# Altium footprint library Connector Header 254.PcbLib: 156 footprints (part 5 of 11)
Each footprint in its own frame and in the unit in brackets; x right, y up, seen from the top. Pads: shape width x height; smd on the part's side, far side on the other; paste and mask are expansions set on the pad; w line width, h text height; cw(c..) or ccw(c..) is an arc to the next point about the centre after c.
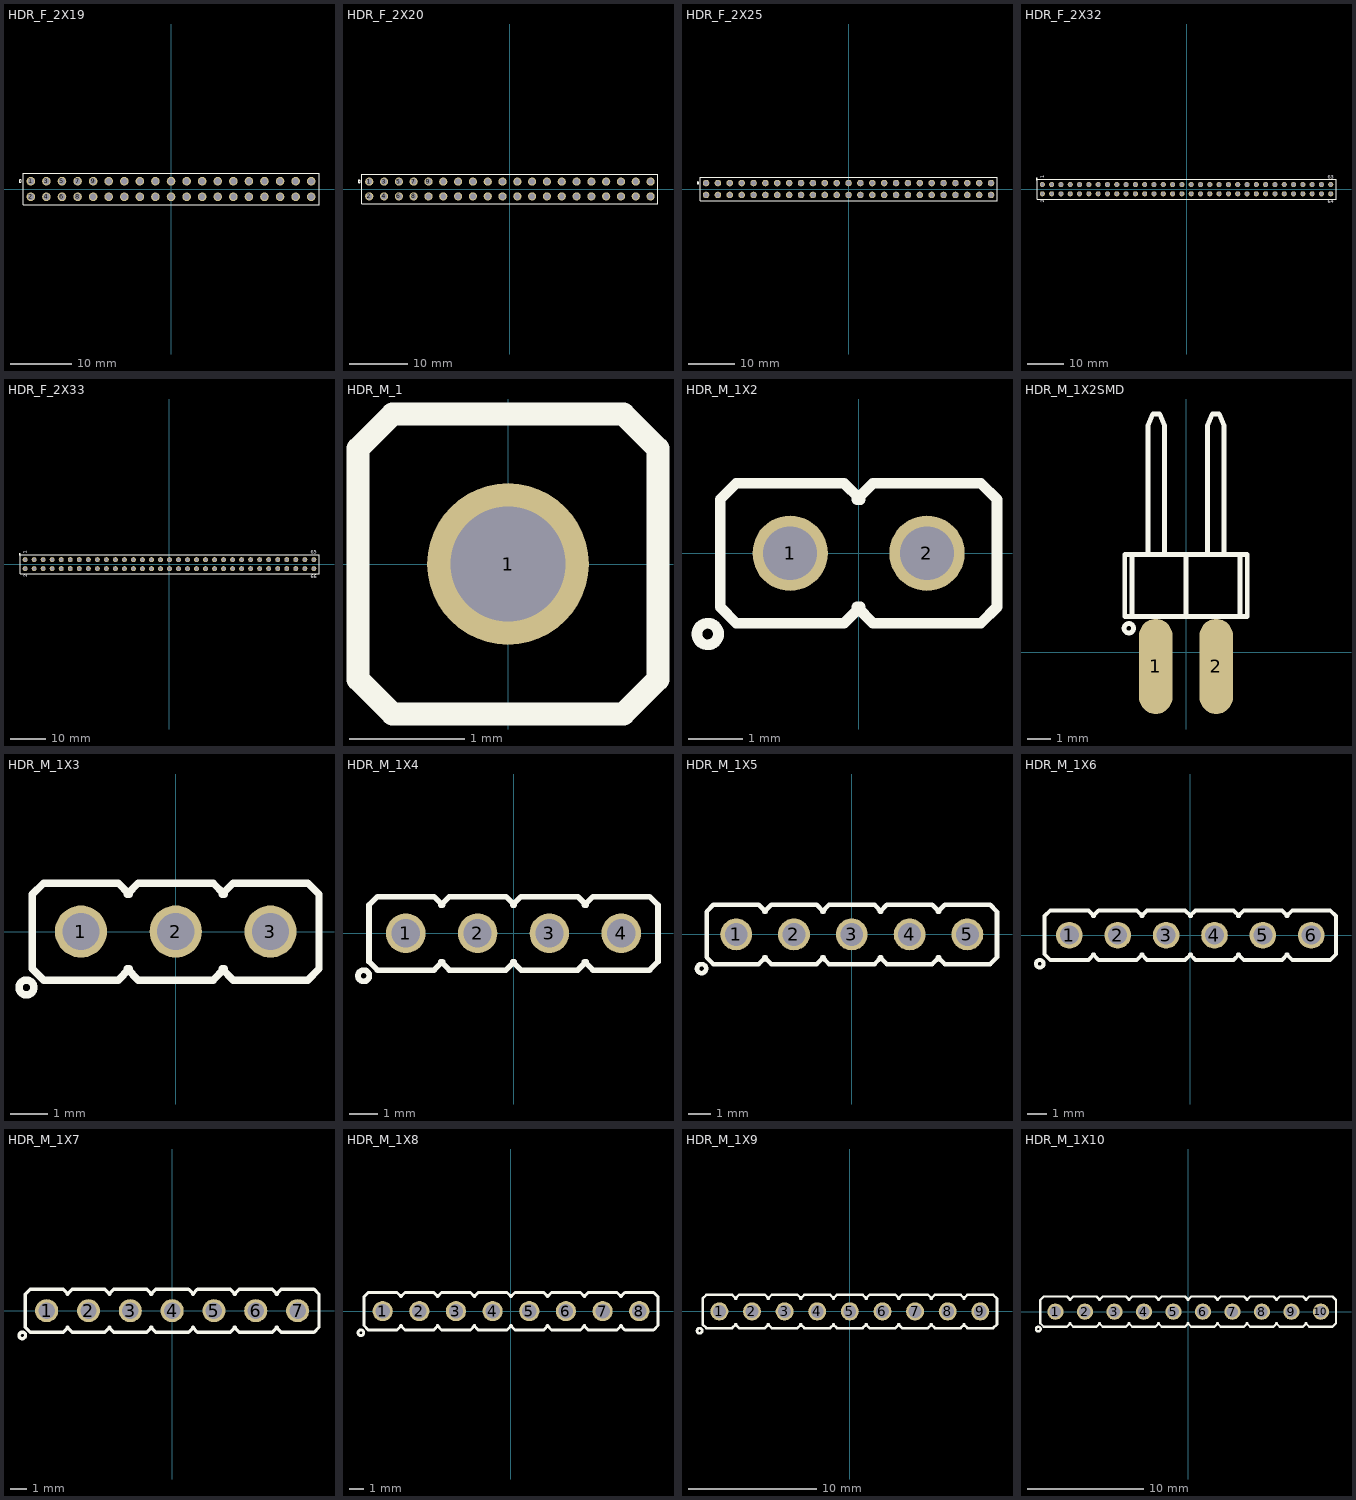
[diagram p4: the footprints below, top view; thin cyan lines are the x and y axes]

## HDR_F_2X19 [mm] "Connector; Header; 19x2 Position"
height 8
pads (38):
  round 1.4 / inner round 1.4 / far side oval 1.4x2.2 hole 1: 1(-22.86,1.27) 2(-22.86,-1.27) 3(-20.32,1.27) 4(-20.32,-1.27) 5(-17.78,1.27) 6(-17.78,-1.27) 7(-15.24,1.27) 8(-15.24,-1.27) 9(-12.7,1.27) 10(-12.7,-1.27) 11(-10.16,1.27) 12(-10.16,-1.27) 13(-7.62,1.27) 14(-7.62,-1.27) 15(-5.08,1.27) 16(-5.08,-1.27) 17(-2.54,1.27) 18(-2.54,-1.27) 19(0,1.27) 20(0,-1.27) 21(2.54,1.27) 22(2.54,-1.27) 23(5.08,1.27) 24(5.08,-1.27) 25(7.62,1.27) 26(7.62,-1.27) 27(10.16,1.27) 28(10.16,-1.27) 29(12.7,1.27) 30(12.7,-1.27) 31(15.24,1.27) 32(15.24,-1.27) 33(17.78,1.27) 34(17.78,-1.27) 35(20.32,1.27) 36(20.32,-1.27) 37(22.86,1.27) 38(22.86,-1.27)
TopOverlay:
  circle w0.2: c-24.59,1.3 r0.2
  lines w0.2: -24.13,-2.54 24.13,-2.54 24.13,2.54 -24.13,2.54 -24.13,-2.54
3D body "PBD-2.stp": height 8.5, standoff -3.15, extent 16.51,-2.54 19.05,2.54
3D body "PBD-2.stp": height 8.5, standoff -3.15, extent 13.97,-2.54 16.51,2.54
3D body "PBD-2.stp": height 8.5, standoff -3.15, extent 19.05,-2.54 21.59,2.54
3D body "PBD-2.stp": height 8.5, standoff -3.15, extent 8.89,-2.54 11.43,2.54
3D body "PBD-2.stp": height 8.5, standoff -3.15, extent 6.35,-2.54 8.89,2.54
3D body "PBD-2.stp": height 8.5, standoff -3.15, extent 11.43,-2.54 13.97,2.54
3D body "PBD-2.stp": height 8.5, standoff -3.15, extent 1.27,-2.54 3.81,2.54
3D body "PBD-2.stp": height 8.5, standoff -3.15, extent -1.27,-2.54 1.27,2.54
3D body "PBD-2.stp": height 8.5, standoff -3.15, extent 3.81,-2.54 6.35,2.54
3D body "PBD-2.stp": height 8.5, standoff -3.15, extent -6.35,-2.54 -3.81,2.54
3D body "PBD-2.stp": height 8.5, standoff -3.15, extent -8.89,-2.54 -6.35,2.54
3D body "PBD-2.stp": height 8.5, standoff -3.15, extent -3.81,-2.54 -1.27,2.54
3D body "PBD-2.stp": height 8.5, standoff -3.15, extent -13.97,-2.54 -11.43,2.54
3D body "PBD-2.stp": height 8.5, standoff -3.15, extent -16.51,-2.54 -13.97,2.54
3D body "PBD-2.stp": height 8.5, standoff -3.15, extent -11.43,-2.54 -8.89,2.54
3D body "PBD-2.stp": height 8.5, standoff -3.15, extent -21.59,-2.54 -19.05,2.54
3D body "PBD-2.stp": height 8.5, standoff -3.15, extent -24.13,-2.54 -21.59,2.54
3D body "PBD-2.stp": height 8.5, standoff -3.15, extent -19.05,-2.54 -16.51,2.54
3D body "PBD-2.stp": height 8.5, standoff -3.15, extent 21.59,-2.54 24.13,2.54

## HDR_F_2X20 [mm] "Connector; Header; 20x2 Position"
height 8
pads (40):
  round 1.4 / inner round 1.4 / far side oval 1.4x2.2 hole 1: 1(-24.13,1.27) 2(-24.13,-1.27) 3(-21.59,1.27) 4(-21.59,-1.27) 5(-19.05,1.27) 6(-19.05,-1.27) 7(-16.51,1.27) 8(-16.51,-1.27) 9(-13.97,1.27) 10(-13.97,-1.27) 11(-11.43,1.27) 12(-11.43,-1.27) 13(-8.89,1.27) 14(-8.89,-1.27) 15(-6.35,1.27) 16(-6.35,-1.27) 17(-3.81,1.27) 18(-3.81,-1.27) 19(-1.27,1.27) 20(-1.27,-1.27) 21(1.27,1.27) 22(1.27,-1.27) 23(3.81,1.27) 24(3.81,-1.27) 25(6.35,1.27) 26(6.35,-1.27) 27(8.89,1.27) 28(8.89,-1.27) 29(11.43,1.27) 30(11.43,-1.27) 31(13.97,1.27) 32(13.97,-1.27) 33(16.51,1.27) 34(16.51,-1.27) 35(19.05,1.27) 36(19.05,-1.27) 37(21.59,1.27) 38(21.59,-1.27) 39(24.13,1.27) 40(24.13,-1.27)
TopOverlay:
  circle w0.2: c-25.86,1.3 r0.2
  lines w0.2: -25.4,-2.54 25.4,-2.54 25.4,2.54 -25.4,2.54 -25.4,-2.54
3D body "PBD-2.stp": height 8.5, standoff -3.15, extent -20.32,-2.54 -17.78,2.54
3D body "PBD-2.stp": height 8.5, standoff -3.15, extent -25.4,-2.54 -22.86,2.54
3D body "PBD-2.stp": height 8.5, standoff -3.15, extent -22.86,-2.54 -20.32,2.54
3D body "PBD-2.stp": height 8.5, standoff -3.15, extent -12.7,-2.54 -10.16,2.54
3D body "PBD-2.stp": height 8.5, standoff -3.15, extent -17.78,-2.54 -15.24,2.54
3D body "PBD-2.stp": height 8.5, standoff -3.15, extent -15.24,-2.54 -12.7,2.54
3D body "PBD-2.stp": height 8.5, standoff -3.15, extent -5.08,-2.54 -2.54,2.54
3D body "PBD-2.stp": height 8.5, standoff -3.15, extent -10.16,-2.54 -7.62,2.54
3D body "PBD-2.stp": height 8.5, standoff -3.15, extent -7.62,-2.54 -5.08,2.54
3D body "PBD-2.stp": height 8.5, standoff -3.15, extent 2.54,-2.54 5.08,2.54
3D body "PBD-2.stp": height 8.5, standoff -3.15, extent -2.54,-2.54 0,2.54
3D body "PBD-2.stp": height 8.5, standoff -3.15, extent 0,-2.54 2.54,2.54
3D body "PBD-2.stp": height 8.5, standoff -3.15, extent 10.16,-2.54 12.7,2.54
3D body "PBD-2.stp": height 8.5, standoff -3.15, extent 5.08,-2.54 7.62,2.54
3D body "PBD-2.stp": height 8.5, standoff -3.15, extent 7.62,-2.54 10.16,2.54
3D body "PBD-2.stp": height 8.5, standoff -3.15, extent 17.78,-2.54 20.32,2.54
3D body "PBD-2.stp": height 8.5, standoff -3.15, extent 12.7,-2.54 15.24,2.54
3D body "PBD-2.stp": height 8.5, standoff -3.15, extent 15.24,-2.54 17.78,2.54
3D body "PBD-2.stp": height 8.5, standoff -3.15, extent 20.32,-2.54 22.86,2.54
3D body "PBD-2.stp": height 8.5, standoff -3.15, extent 22.86,-2.54 25.4,2.54

## HDR_F_2X25 [mm] "Connector; Header; 20x2 Position"
height 8
pads (50):
  round 1.4 / inner round 1.4 / far side oval 1.4x2.2 hole 1: 1(-30.48,1.27) 2(-30.48,-1.27) 3(-27.94,1.27) 4(-27.94,-1.27) 5(-25.4,1.27) 6(-25.4,-1.27) 7(-22.86,1.27) 8(-22.86,-1.27) 9(-20.32,1.27) 10(-20.32,-1.27) 11(-17.78,1.27) 12(-17.78,-1.27) 13(-15.24,1.27) 14(-15.24,-1.27) 15(-12.7,1.27) 16(-12.7,-1.27) 17(-10.16,1.27) 18(-10.16,-1.27) 19(-7.62,1.27) 20(-7.62,-1.27) 21(-5.08,1.27) 22(-5.08,-1.27) 23(-2.54,1.27) 24(-2.54,-1.27) 25(0,1.27) 26(0,-1.27) 27(2.54,1.27) 28(2.54,-1.27) 29(5.08,1.27) 30(5.08,-1.27) 31(7.62,1.27) 32(7.62,-1.27) 33(10.16,1.27) 34(10.16,-1.27) 35(12.7,1.27) 36(12.7,-1.27) 37(15.24,1.27) 38(15.24,-1.27) 39(17.78,1.27) 40(17.78,-1.27) 41(20.32,1.27) 42(20.32,-1.27) 43(22.86,1.27) 44(22.86,-1.27) 45(25.4,1.27) 46(25.4,-1.27) 47(27.94,1.27) 48(27.94,-1.27) 49(30.48,1.27) 50(30.48,-1.27)
TopOverlay:
  circle w0.2: c-32.21,1.3 r0.2
  lines w0.2: -31.75,-2.54 31.75,-2.54 31.75,2.54 -31.75,2.54 -31.75,-2.54
3D body "PBD-2.stp": height 8.5, standoff -3.15, extent -26.67,-2.54 -24.13,2.54
3D body "PBD-2.stp": height 8.5, standoff -3.15, extent -31.75,-2.54 -29.21,2.54
3D body "PBD-2.stp": height 8.5, standoff -3.15, extent -29.21,-2.54 -26.67,2.54
3D body "PBD-2.stp": height 8.5, standoff -3.15, extent -19.05,-2.54 -16.51,2.54
3D body "PBD-2.stp": height 8.5, standoff -3.15, extent -24.13,-2.54 -21.59,2.54
3D body "PBD-2.stp": height 8.5, standoff -3.15, extent -21.59,-2.54 -19.05,2.54
3D body "PBD-2.stp": height 8.5, standoff -3.15, extent -11.43,-2.54 -8.89,2.54
3D body "PBD-2.stp": height 8.5, standoff -3.15, extent -16.51,-2.54 -13.97,2.54
3D body "PBD-2.stp": height 8.5, standoff -3.15, extent -13.97,-2.54 -11.43,2.54
3D body "PBD-2.stp": height 8.5, standoff -3.15, extent -3.81,-2.54 -1.27,2.54
3D body "PBD-2.stp": height 8.5, standoff -3.15, extent -8.89,-2.54 -6.35,2.54
3D body "PBD-2.stp": height 8.5, standoff -3.15, extent -6.35,-2.54 -3.81,2.54
3D body "PBD-2.stp": height 8.5, standoff -3.15, extent 3.81,-2.54 6.35,2.54
3D body "PBD-2.stp": height 8.5, standoff -3.15, extent -1.27,-2.54 1.27,2.54
3D body "PBD-2.stp": height 8.5, standoff -3.15, extent 1.27,-2.54 3.81,2.54
3D body "PBD-2.stp": height 8.5, standoff -3.15, extent 11.43,-2.54 13.97,2.54
3D body "PBD-2.stp": height 8.5, standoff -3.15, extent 6.35,-2.54 8.89,2.54
3D body "PBD-2.stp": height 8.5, standoff -3.15, extent 8.89,-2.54 11.43,2.54
3D body "PBD-2.stp": height 8.5, standoff -3.15, extent 13.97,-2.54 16.51,2.54
3D body "PBD-2.stp": height 8.5, standoff -3.15, extent 16.51,-2.54 19.05,2.54
3D body "PBD-2.stp": height 8.5, standoff -3.15, extent 19.05,-2.54 21.59,2.54
3D body "PBD-2.stp": height 8.5, standoff -3.15, extent 21.59,-2.54 24.13,2.54
3D body "PBD-2.stp": height 8.5, standoff -3.15, extent 24.13,-2.54 26.67,2.54
3D body "PBD-2.stp": height 8.5, standoff -3.15, extent 26.67,-2.54 29.21,2.54
3D body "PBD-2.stp": height 8.5, standoff -3.15, extent 29.21,-2.54 31.75,2.54

## HDR_F_2X32 [mm] "Male Header 2X32 with 2.54 mm Pitch"
pads (64):
  round 1.4 / inner round 1.4 / far side oval 1.4x2.2 hole 1: 1(-39.37,1.27) 2(-39.37,-1.27) 3(-36.83,1.27) 4(-36.83,-1.27) 5(-34.29,1.27) 6(-34.29,-1.27) 7(-31.75,1.27) 8(-31.75,-1.27) 9(-29.21,1.27) 10(-29.21,-1.27) 11(-26.67,1.27) 12(-26.67,-1.27) 13(-24.13,1.27) 14(-24.13,-1.27) 15(-21.59,1.27) 16(-21.59,-1.27) 17(-19.05,1.27) 18(-19.05,-1.27) 19(-16.51,1.27) 20(-16.51,-1.27) 21(-13.97,1.27) 22(-13.97,-1.27) 23(-11.43,1.27) 24(-11.43,-1.27) 25(-8.89,1.27) 26(-8.89,-1.27) 27(-6.35,1.27) 28(-6.35,-1.27) 29(-3.81,1.27) 30(-3.81,-1.27) 31(-1.27,1.27) 32(-1.27,-1.27) 33(1.27,1.27) 34(1.27,-1.27) 35(3.81,1.27) 36(3.81,-1.27) 37(6.35,1.27) 38(6.35,-1.27) 39(8.89,1.27) 40(8.89,-1.27) 41(11.43,1.27) 42(11.43,-1.27) 43(13.97,1.27) 44(13.97,-1.27) 45(16.51,1.27) 46(16.51,-1.27) 47(19.05,1.27) 48(19.05,-1.27) 49(21.59,1.27) 50(21.59,-1.27) 51(24.13,1.27) 52(24.13,-1.27) 53(26.67,1.27) 54(26.67,-1.27) 55(29.21,1.27) 56(29.21,-1.27) 57(31.75,1.27) 58(31.75,-1.27) 59(34.29,1.27) 60(34.29,-1.27) 61(36.83,1.27) 62(36.83,-1.27) 63(39.37,1.27) 64(39.37,-1.27)
TopOverlay:
  circle w0.2: c-40.9,2.8 r0.2
  lines w0.2: -40.8,-2.7 -40.8,2.7 40.8,2.7 40.8,-2.7 -40.8,-2.7
  text "63" at 38.6,2.9 h1
  text "64" at 38.6,-3.9 h1
  text "1" at -38.9,3 h1
  text "2" at -38.8,-3.7 h1
3D body "PBD-2.stp": height 8.5, standoff -3.15, extent -35.56,-2.54 -33.02,2.54
3D body "PBD-2.stp": height 8.5, standoff -3.15, extent -40.64,-2.54 -38.1,2.54
3D body "PBD-2.stp": height 8.5, standoff -3.15, extent -38.1,-2.54 -35.56,2.54
3D body "PBD-2.stp": height 8.5, standoff -3.15, extent -27.94,-2.54 -25.4,2.54
3D body "PBD-2.stp": height 8.5, standoff -3.15, extent -33.02,-2.54 -30.48,2.54
3D body "PBD-2.stp": height 8.5, standoff -3.15, extent -30.48,-2.54 -27.94,2.54
3D body "PBD-2.stp": height 8.5, standoff -3.15, extent -20.32,-2.54 -17.78,2.54
3D body "PBD-2.stp": height 8.5, standoff -3.15, extent -25.4,-2.54 -22.86,2.54
3D body "PBD-2.stp": height 8.5, standoff -3.15, extent -22.86,-2.54 -20.32,2.54
3D body "PBD-2.stp": height 8.5, standoff -3.15, extent -12.7,-2.54 -10.16,2.54
3D body "PBD-2.stp": height 8.5, standoff -3.15, extent -17.78,-2.54 -15.24,2.54
3D body "PBD-2.stp": height 8.5, standoff -3.15, extent -15.24,-2.54 -12.7,2.54
3D body "PBD-2.stp": height 8.5, standoff -3.15, extent -5.08,-2.54 -2.54,2.54
3D body "PBD-2.stp": height 8.5, standoff -3.15, extent -10.16,-2.54 -7.62,2.54
3D body "PBD-2.stp": height 8.5, standoff -3.15, extent -7.62,-2.54 -5.08,2.54
3D body "PBD-2.stp": height 8.5, standoff -3.15, extent 2.54,-2.54 5.08,2.54
3D body "PBD-2.stp": height 8.5, standoff -3.15, extent -2.54,-2.54 0,2.54
3D body "PBD-2.stp": height 8.5, standoff -3.15, extent 0,-2.54 2.54,2.54
3D body "PBD-2.stp": height 8.5, standoff -3.15, extent 5.08,-2.54 7.62,2.54
3D body "PBD-2.stp": height 8.5, standoff -3.15, extent 7.62,-2.54 10.16,2.54
3D body "PBD-2.stp": height 8.5, standoff -3.15, extent 10.16,-2.54 12.7,2.54
3D body "PBD-2.stp": height 8.5, standoff -3.15, extent 12.7,-2.54 15.24,2.54
3D body "PBD-2.stp": height 8.5, standoff -3.15, extent 15.24,-2.54 17.78,2.54
3D body "PBD-2.stp": height 8.5, standoff -3.15, extent 17.78,-2.54 20.32,2.54
3D body "PBD-2.stp": height 8.5, standoff -3.15, extent 20.32,-2.54 22.86,2.54
3D body "PBD-2.stp": height 8.5, standoff -3.15, extent 27.94,-2.54 30.48,2.54
3D body "PBD-2.stp": height 8.5, standoff -3.15, extent 22.86,-2.54 25.4,2.54
3D body "PBD-2.stp": height 8.5, standoff -3.15, extent 25.4,-2.54 27.94,2.54
3D body "PBD-2.stp": height 8.5, standoff -3.15, extent 35.56,-2.54 38.1,2.54
3D body "PBD-2.stp": height 8.5, standoff -3.15, extent 30.48,-2.54 33.02,2.54
3D body "PBD-2.stp": height 8.5, standoff -3.15, extent 33.02,-2.54 35.56,2.54
3D body "PBD-2.stp": height 8.5, standoff -3.15, extent 38.1,-2.54 40.64,2.54

## HDR_F_2X33 [mm] "Male Header 2X32 with 2.54 mm Pitch"
pads (66):
  round 1.4 / inner round 1.4 / far side oval 1.4x2.2 hole 1: 1(-40.64,1.27) 2(-40.64,-1.27) 3(-38.1,1.27) 4(-38.1,-1.27) 5(-35.56,1.27) 6(-35.56,-1.27) 7(-33.02,1.27) 8(-33.02,-1.27) 9(-30.48,1.27) 10(-30.48,-1.27) 11(-27.94,1.27) 12(-27.94,-1.27) 13(-25.4,1.27) 14(-25.4,-1.27) 15(-22.86,1.27) 16(-22.86,-1.27) 17(-20.32,1.27) 18(-20.32,-1.27) 19(-17.78,1.27) 20(-17.78,-1.27) 21(-15.24,1.27) 22(-15.24,-1.27) 23(-12.7,1.27) 24(-12.7,-1.27) 25(-10.16,1.27) 26(-10.16,-1.27) 27(-7.62,1.27) 28(-7.62,-1.27) 29(-5.08,1.27) 30(-5.08,-1.27) 31(-2.54,1.27) 32(-2.54,-1.27) 33(0,1.27) 34(0,-1.27) 35(2.54,1.27) 36(2.54,-1.27) 37(5.08,1.27) 38(5.08,-1.27) 39(7.62,1.27) 40(7.62,-1.27) 41(10.16,1.27) 42(10.16,-1.27) 43(12.7,1.27) 44(12.7,-1.27) 45(15.24,1.27) 46(15.24,-1.27) 47(17.78,1.27) 48(17.78,-1.27) 49(20.32,1.27) 50(20.32,-1.27) 51(22.86,1.27) 52(22.86,-1.27) 53(25.4,1.27) 54(25.4,-1.27) 55(27.94,1.27) 56(27.94,-1.27) 57(30.48,1.27) 58(30.48,-1.27) 59(33.02,1.27) 60(33.02,-1.27) 61(35.56,1.27) 62(35.56,-1.27) 63(38.1,1.27) 64(38.1,-1.27) 65(40.64,1.27) 66(40.64,-1.27)
TopOverlay:
  circle w0.2: c-42.17,2.8 r0.2
  lines w0.2: -42.07,-2.7 -42.07,2.7 42.1,2.7 42.1,-2.7 -42.07,-2.7
  text "65" at 39.83,2.9 h1
  text "66" at 39.83,-3.9 h1
  text "1" at -40.17,3 h1
  text "2" at -40.07,-3.7 h1
3D body "PBD-2.stp": height 8.5, standoff -3.15, extent 39.37,-2.54 41.91,2.54
3D body "PBD-2.stp": height 8.5, standoff -3.15, extent -36.83,-2.54 -34.29,2.54
3D body "PBD-2.stp": height 8.5, standoff -3.15, extent -41.91,-2.54 -39.37,2.54
3D body "PBD-2.stp": height 8.5, standoff -3.15, extent -39.37,-2.54 -36.83,2.54
3D body "PBD-2.stp": height 8.5, standoff -3.15, extent -29.21,-2.54 -26.67,2.54
3D body "PBD-2.stp": height 8.5, standoff -3.15, extent -34.29,-2.54 -31.75,2.54
3D body "PBD-2.stp": height 8.5, standoff -3.15, extent -31.75,-2.54 -29.21,2.54
3D body "PBD-2.stp": height 8.5, standoff -3.15, extent -21.59,-2.54 -19.05,2.54
3D body "PBD-2.stp": height 8.5, standoff -3.15, extent -26.67,-2.54 -24.13,2.54
3D body "PBD-2.stp": height 8.5, standoff -3.15, extent -24.13,-2.54 -21.59,2.54
3D body "PBD-2.stp": height 8.5, standoff -3.15, extent -13.97,-2.54 -11.43,2.54
3D body "PBD-2.stp": height 8.5, standoff -3.15, extent -19.05,-2.54 -16.51,2.54
3D body "PBD-2.stp": height 8.5, standoff -3.15, extent -16.51,-2.54 -13.97,2.54
3D body "PBD-2.stp": height 8.5, standoff -3.15, extent -6.35,-2.54 -3.81,2.54
3D body "PBD-2.stp": height 8.5, standoff -3.15, extent -11.43,-2.54 -8.89,2.54
3D body "PBD-2.stp": height 8.5, standoff -3.15, extent -8.89,-2.54 -6.35,2.54
3D body "PBD-2.stp": height 8.5, standoff -3.15, extent 1.27,-2.54 3.81,2.54
3D body "PBD-2.stp": height 8.5, standoff -3.15, extent -3.81,-2.54 -1.27,2.54
3D body "PBD-2.stp": height 8.5, standoff -3.15, extent -1.27,-2.54 1.27,2.54
3D body "PBD-2.stp": height 8.5, standoff -3.15, extent 3.81,-2.54 6.35,2.54
3D body "PBD-2.stp": height 8.5, standoff -3.15, extent 6.35,-2.54 8.89,2.54
3D body "PBD-2.stp": height 8.5, standoff -3.15, extent 8.89,-2.54 11.43,2.54
3D body "PBD-2.stp": height 8.5, standoff -3.15, extent 11.43,-2.54 13.97,2.54
3D body "PBD-2.stp": height 8.5, standoff -3.15, extent 13.97,-2.54 16.51,2.54
3D body "PBD-2.stp": height 8.5, standoff -3.15, extent 16.51,-2.54 19.05,2.54
3D body "PBD-2.stp": height 8.5, standoff -3.15, extent 19.05,-2.54 21.59,2.54
3D body "PBD-2.stp": height 8.5, standoff -3.15, extent 26.67,-2.54 29.21,2.54
3D body "PBD-2.stp": height 8.5, standoff -3.15, extent 21.59,-2.54 24.13,2.54
3D body "PBD-2.stp": height 8.5, standoff -3.15, extent 24.13,-2.54 26.67,2.54
3D body "PBD-2.stp": height 8.5, standoff -3.15, extent 34.29,-2.54 36.83,2.54
3D body "PBD-2.stp": height 8.5, standoff -3.15, extent 29.21,-2.54 31.75,2.54
3D body "PBD-2.stp": height 8.5, standoff -3.15, extent 31.75,-2.54 34.29,2.54
3D body "PBD-2.stp": height 8.5, standoff -3.15, extent 36.83,-2.54 39.37,2.54

## HDR_M_1 [mm] "Connector; Header; 1 Position"
pads (1):
  round 1.4 / inner round 1.4 / far side oval 1.4x2.2 hole 1 mask+0.1: 1(0,0)
TopOverlay:
  lines w0.2: -1.3,-1 -1.3,1 -1,1.3 1,1.3 1.3,1 1.3,-1 1,-1.3 -1,-1.3 -1.3,-1
3D body "PLS-1.step": height 8.54, standoff -2.9, extent -1.27,-1.27 1.27,1.27

## HDR_M_1X2 [mm] "Connector; Header; 2 Position"
pads (2):
  round 1.4 / inner round 1.4 / far side oval 1.4x2.2 hole 1 mask+0.1: 1(-1.27,0) 2(1.27,0)
TopOverlay:
  circle w0.2: c-2.8,-1.5 r0.2
  lines w0.2: -0.03,-1 0.27,-1.3 2.27,-1.3 2.57,-1 2.57,1 2.27,1.3 0.27,1.3 -0.03,1 ; 0.03,-1 -0.27,-1.3 -2.27,-1.3 -2.57,-1 -2.57,1 -2.27,1.3 -0.27,1.3 0.03,1
3D body "pin_header_aw140-eg-g02a.stp": height 8.72, standoff -3.68, extent -2.54,-1.25 2.44,1.25

## HDR_M_1X2SMD [mm] "Connector; Header; 2 Position"
height 1.8
pads (2):
  oval 1.4x4 smd mask+0.1: 1(-1.27,-0.6) 2(1.27,-0.6)
TopOverlay:
  circle w0.2: c-2.4,1 r0.2
  lines w0.2: -2.27,1.5 -2.27,4.1 ; -1.6,4.1 -1.6,9.5 -1.4,10 -1.1,10 -0.9,9.5 ; -0.9,4.1 -0.9,9.5 ; 0,1.5 0,4.1 ; 0.9,4.1 0.9,9.5 ; 1.6,4.1 1.6,9.5 1.4,10 1.1,10 0.9,9.5 ; 2.27,1.5 2.27,4.1 ; -0.9,9.5 -0.9,9.5 ; 0.9,9.5 0.9,9.5 ; -2.57,1.5 2.57,1.5 2.57,4.1 -2.57,4.1 -2.57,1.5
3D body "pin_header_aw140-eg-g02a.stp": height 1.55, standoff -0.95, extent -2.54,-2.38 2.44,10.02

## HDR_M_1X3 [mm] "Connector; Header; 3 Position"
pads (3):
  round 1.4 / inner round 1.4 / far side oval 1.4x2.2 hole 1 mask+0.1: 1(-2.54,0) 2(0,0) 3(2.54,0)
TopOverlay:
  circle w0.2: c-4,-1.5 r0.2
  lines w0.2: -1.3,-1 -1,-1.3 1,-1.3 1.3,-1 ; -1.3,1 -1,1.3 1,1.3 1.3,1 ; -1.24,-1 -1.54,-1.3 -3.54,-1.3 -3.84,-1 -3.84,1 -3.54,1.3 -1.54,1.3 -1.24,1 ; 1.24,-1 1.54,-1.3 3.54,-1.3 3.84,-1 3.84,1 3.54,1.3 1.54,1.3 1.24,1
3D body "PLS-1.step": height 8.54, standoff -2.9, extent 1.295,-1.27 3.835,1.27
3D body "PLS-1.step": height 8.54, standoff -2.9, extent -3.785,-1.27 -1.245,1.27
3D body "PLS-1.step": height 8.54, standoff -2.9, extent -1.245,-1.27 1.295,1.27

## HDR_M_1X4 [mm] "Connector; Header; 4 Position"
pads (4):
  round 1.4 / inner round 1.4 / far side oval 1.4x2.2 hole 1 mask+0.1: 1(-3.81,0) 2(-1.27,0) 3(1.27,0) 4(3.81,0)
TopOverlay:
  circle w0.2: c-5.3,-1.5 r0.2
  lines w0.2: -2.57,-1 -2.27,-1.3 -0.27,-1.3 0.03,-1 ; -2.57,1 -2.27,1.3 -0.27,1.3 0.03,1 ; -2.51,-1 -2.81,-1.3 -4.81,-1.3 -5.11,-1 -5.11,1 -4.81,1.3 -2.81,1.3 -2.51,1 ; -0.03,-1 0.27,-1.3 2.27,-1.3 2.57,-1 ; -0.03,1 0.27,1.3 2.27,1.3 2.57,1 ; 2.51,-1 2.81,-1.3 4.81,-1.3 5.11,-1 5.11,1 4.81,1.3 2.81,1.3 2.51,1
3D body "PLS-1.step": height 8.54, standoff -2.9, extent 2.54,-1.27 5.08,1.27
3D body "PLS-1.step": height 8.54, standoff -2.9, extent 0,-1.27 2.54,1.27
3D body "PLS-1.step": height 8.54, standoff -2.9, extent -5.08,-1.27 -2.54,1.27
3D body "PLS-1.step": height 8.54, standoff -2.9, extent -2.54,-1.27 0,1.27

## HDR_M_1X5 [mm] "Connector; Header; 5 Position"
pads (5):
  round 1.4 / inner round 1.4 / far side oval 1.4x2.2 hole 1 mask+0.1: 1(-5.08,0) 2(-2.54,0) 3(0,0) 4(2.54,0) 5(5.08,0)
TopOverlay:
  circle w0.2: c-6.6,-1.5 r0.2
  lines w0.2: -3.84,-1 -3.54,-1.3 -1.54,-1.3 -1.24,-1 ; -3.84,1 -3.54,1.3 -1.54,1.3 -1.24,1 ; -3.78,-1 -4.08,-1.3 -6.08,-1.3 -6.38,-1 -6.38,1 -6.08,1.3 -4.08,1.3 -3.78,1 ; -1.3,-1 -1,-1.3 1,-1.3 1.3,-1 ; -1.3,1 -1,1.3 1,1.3 1.3,1 ; 1.24,-1 1.54,-1.3 3.54,-1.3 3.84,-1 ; 1.24,1 1.54,1.3 3.54,1.3 3.84,1 ; 3.78,-1 4.08,-1.3 6.08,-1.3 6.38,-1 6.38,1 6.08,1.3 4.08,1.3 3.78,1
3D body "PLS-1.step": height 8.54, standoff -2.9, extent -3.81,-1.27 -1.27,1.27
3D body "PLS-1.step": height 8.54, standoff -2.9, extent -6.35,-1.27 -3.81,1.27
3D body "PLS-1.step": height 8.54, standoff -2.9, extent -1.27,-1.27 1.27,1.27
3D body "PLS-1.step": height 8.54, standoff -2.9, extent 1.27,-1.27 3.81,1.27
3D body "PLS-1.step": height 8.54, standoff -2.9, extent 3.81,-1.27 6.35,1.27

## HDR_M_1X6 [mm] "Connector; Header; 6 Position"
pads (6):
  round 1.4 / inner round 1.4 / far side oval 1.4x2.2 hole 1 mask+0.1: 1(-6.35,0) 2(-3.81,0) 3(-1.27,0) 4(1.27,0) 5(3.81,0) 6(6.35,0)
TopOverlay:
  circle w0.2: c-7.9,-1.5 r0.2
  lines w0.2: -5.11,-1 -4.81,-1.3 -2.81,-1.3 -2.51,-1 ; -5.11,1 -4.81,1.3 -2.81,1.3 -2.51,1 ; -5.05,-1 -5.35,-1.3 -7.35,-1.3 -7.65,-1 -7.65,1 -7.35,1.3 -5.35,1.3 -5.05,1 ; -2.57,-1 -2.27,-1.3 -0.27,-1.3 0.03,-1 ; -2.57,1 -2.27,1.3 -0.27,1.3 0.03,1 ; -0.03,-1 0.27,-1.3 2.27,-1.3 2.57,-1 ; -0.03,1 0.27,1.3 2.27,1.3 2.57,1 ; 2.51,-1 2.81,-1.3 4.81,-1.3 5.11,-1 ; 2.51,1 2.81,1.3 4.81,1.3 5.11,1 ; 5.05,-1 5.35,-1.3 7.35,-1.3 7.65,-1 7.65,1 7.35,1.3 5.35,1.3 5.05,1
3D body "User Library-Header_Male_6Pin.STEP": height 8.54, standoff -3, extent -7.62,-1.3 7.62,1.19

## HDR_M_1X7 [mm] "Connector; Header; 7 Position"
pads (7):
  round 1.4 / inner round 1.4 / far side oval 1.4x2.2 hole 1 mask+0.1: 1(-7.62,0) 2(-5.08,0) 3(-2.54,0) 4(0,0) 5(2.54,0) 6(5.08,0) 7(7.62,0)
TopOverlay:
  circle w0.2: c-9.1,-1.5 r0.2
  lines w0.2: -6.38,-1 -6.08,-1.3 -4.08,-1.3 -3.78,-1 ; -6.38,1 -6.08,1.3 -4.08,1.3 -3.78,1 ; -6.32,-1 -6.62,-1.3 -8.62,-1.3 -8.92,-1 -8.92,1 -8.62,1.3 -6.62,1.3 -6.32,1 ; -3.84,-1 -3.54,-1.3 -1.54,-1.3 -1.24,-1 ; -3.84,1 -3.54,1.3 -1.54,1.3 -1.24,1 ; -1.3,-1 -1,-1.3 1,-1.3 1.3,-1 ; -1.3,1 -1,1.3 1,1.3 1.3,1 ; 1.24,-1 1.54,-1.3 3.54,-1.3 3.84,-1 ; 1.24,1 1.54,1.3 3.54,1.3 3.84,1 ; 3.78,-1 4.08,-1.3 6.08,-1.3 6.38,-1 ; 3.78,1 4.08,1.3 6.08,1.3 6.38,1 ; 6.32,-1 6.62,-1.3 8.62,-1.3 8.92,-1 8.92,1 8.62,1.3 6.62,1.3 6.32,1
3D body "User Library-Header_Male_7Pin.STEP": height 8.54, standoff -3, extent -8.89,-1.3 8.89,1.19

## HDR_M_1X8 [mm] "Connector; Header; 8 Position"
pads (8):
  round 1.4 / inner round 1.4 / far side oval 1.4x2.2 hole 1 mask+0.1: 1(-8.89,0) 2(-6.35,0) 3(-3.81,0) 4(-1.27,0) 5(1.27,0) 6(3.81,0) 7(6.35,0) 8(8.89,0)
TopOverlay:
  circle w0.2: c-10.4,-1.5 r0.2
  lines w0.2: -7.65,-1 -7.35,-1.3 -5.35,-1.3 -5.05,-1 ; -7.65,1 -7.35,1.3 -5.35,1.3 -5.05,1 ; -7.59,-1 -7.89,-1.3 -9.89,-1.3 -10.19,-1 -10.19,1 -9.89,1.3 -7.89,1.3 -7.59,1 ; -5.11,-1 -4.81,-1.3 -2.81,-1.3 -2.51,-1 ; -5.11,1 -4.81,1.3 -2.81,1.3 -2.51,1 ; -2.57,-1 -2.27,-1.3 -0.27,-1.3 0.03,-1 ; -2.57,1 -2.27,1.3 -0.27,1.3 0.03,1 ; -0.03,-1 0.27,-1.3 2.27,-1.3 2.57,-1 ; -0.03,1 0.27,1.3 2.27,1.3 2.57,1 ; 2.51,-1 2.81,-1.3 4.81,-1.3 5.11,-1 ; 2.51,1 2.81,1.3 4.81,1.3 5.11,1 ; 5.05,-1 5.35,-1.3 7.35,-1.3 7.65,-1 ; 5.05,1 5.35,1.3 7.35,1.3 7.65,1 ; 7.59,-1 7.89,-1.3 9.89,-1.3 10.19,-1 10.19,1 9.89,1.3 7.89,1.3 7.59,1
3D body "User Library-Header_Male_8Pin.STEP": height 8.54, standoff -3, extent -10.16,-1.3 10.16,1.19

## HDR_M_1X9 [mm] "Connector; Header; 9 Position"
pads (9):
  round 1.4 / inner round 1.4 / far side oval 1.4x2.2 hole 1 mask+0.1: 1(-10.16,0) 2(-7.62,0) 3(-5.08,0) 4(-2.54,0) 5(0,0) 6(2.54,0) 7(5.08,0) 8(7.62,0) 9(10.16,0)
TopOverlay:
  circle w0.2: c-11.7,-1.5 r0.2
  lines w0.2: -8.92,-1 -8.62,-1.3 -6.62,-1.3 -6.32,-1 ; -8.92,1 -8.62,1.3 -6.62,1.3 -6.32,1 ; -8.86,-1 -9.16,-1.3 -11.16,-1.3 -11.46,-1 -11.46,1 -11.16,1.3 -9.16,1.3 -8.86,1 ; -6.38,-1 -6.08,-1.3 -4.08,-1.3 -3.78,-1 ; -6.38,1 -6.08,1.3 -4.08,1.3 -3.78,1 ; -3.84,-1 -3.54,-1.3 -1.54,-1.3 -1.24,-1 ; -3.84,1 -3.54,1.3 -1.54,1.3 -1.24,1 ; -1.3,-1 -1,-1.3 1,-1.3 1.3,-1 ; -1.3,1 -1,1.3 1,1.3 1.3,1 ; 1.24,-1 1.54,-1.3 3.54,-1.3 3.84,-1 ; 1.24,1 1.54,1.3 3.54,1.3 3.84,1 ; 3.78,-1 4.08,-1.3 6.08,-1.3 6.38,-1 ; 3.78,1 4.08,1.3 6.08,1.3 6.38,1 ; 6.32,-1 6.62,-1.3 8.62,-1.3 8.92,-1 ; 6.32,1 6.62,1.3 8.62,1.3 8.92,1 ; 8.86,-1 9.16,-1.3 11.16,-1.3 11.46,-1 11.46,1 11.16,1.3 9.16,1.3 8.86,1
3D body "User Library-Header_Male_9Pin.STEP": height 8.54, standoff -3, extent -11.43,-1.3 11.43,1.19

## HDR_M_1X10 [mm] "Connector; Header; 10 Position"
pads (10):
  round 1.4 / inner round 1.4 / far side oval 1.4x2.2 hole 1 mask+0.1: 1(-11.43,0) 2(-8.89,0) 3(-6.35,0) 4(-3.81,0) 5(-1.27,0) 6(1.27,0) 7(3.81,0) 8(6.35,0) 9(8.89,0) 10(11.43,0)
TopOverlay:
  circle w0.2: c-12.9,-1.5 r0.2
  lines w0.2: -10.19,-1 -9.89,-1.3 -7.89,-1.3 -7.59,-1 ; -10.19,1 -9.89,1.3 -7.89,1.3 -7.59,1 ; -10.13,-1 -10.43,-1.3 -12.43,-1.3 -12.73,-1 -12.73,1 -12.43,1.3 -10.43,1.3 -10.13,1 ; -7.65,-1 -7.35,-1.3 -5.35,-1.3 -5.05,-1 ; -7.65,1 -7.35,1.3 -5.35,1.3 -5.05,1 ; -5.11,-1 -4.81,-1.3 -2.81,-1.3 -2.51,-1 ; -5.11,1 -4.81,1.3 -2.81,1.3 -2.51,1 ; -2.57,-1 -2.27,-1.3 -0.27,-1.3 0.03,-1 ; -2.57,1 -2.27,1.3 -0.27,1.3 0.03,1 ; -0.03,-1 0.27,-1.3 2.27,-1.3 2.57,-1 ; -0.03,1 0.27,1.3 2.27,1.3 2.57,1 ; 2.51,-1 2.81,-1.3 4.81,-1.3 5.11,-1 ; 2.51,1 2.81,1.3 4.81,1.3 5.11,1 ; 5.05,-1 5.35,-1.3 7.35,-1.3 7.65,-1 ; 5.05,1 5.35,1.3 7.35,1.3 7.65,1 ; 7.59,-1 7.89,-1.3 9.89,-1.3 10.19,-1 ; 7.59,1 7.89,1.3 9.89,1.3 10.19,1 ; 10.13,-1 10.43,-1.3 12.43,-1.3 12.73,-1 12.73,1 12.43,1.3 10.43,1.3 10.13,1
3D body "User Library-Header_Male_10Pin.STEP": height 8.54, standoff -3, extent -12.7,-1.3 12.7,1.19